# Altium schematic symbol library Miscellaneous.SchLib: 49 symbols
Pins are listed as number, name and electrical type; pins without a type are passive.

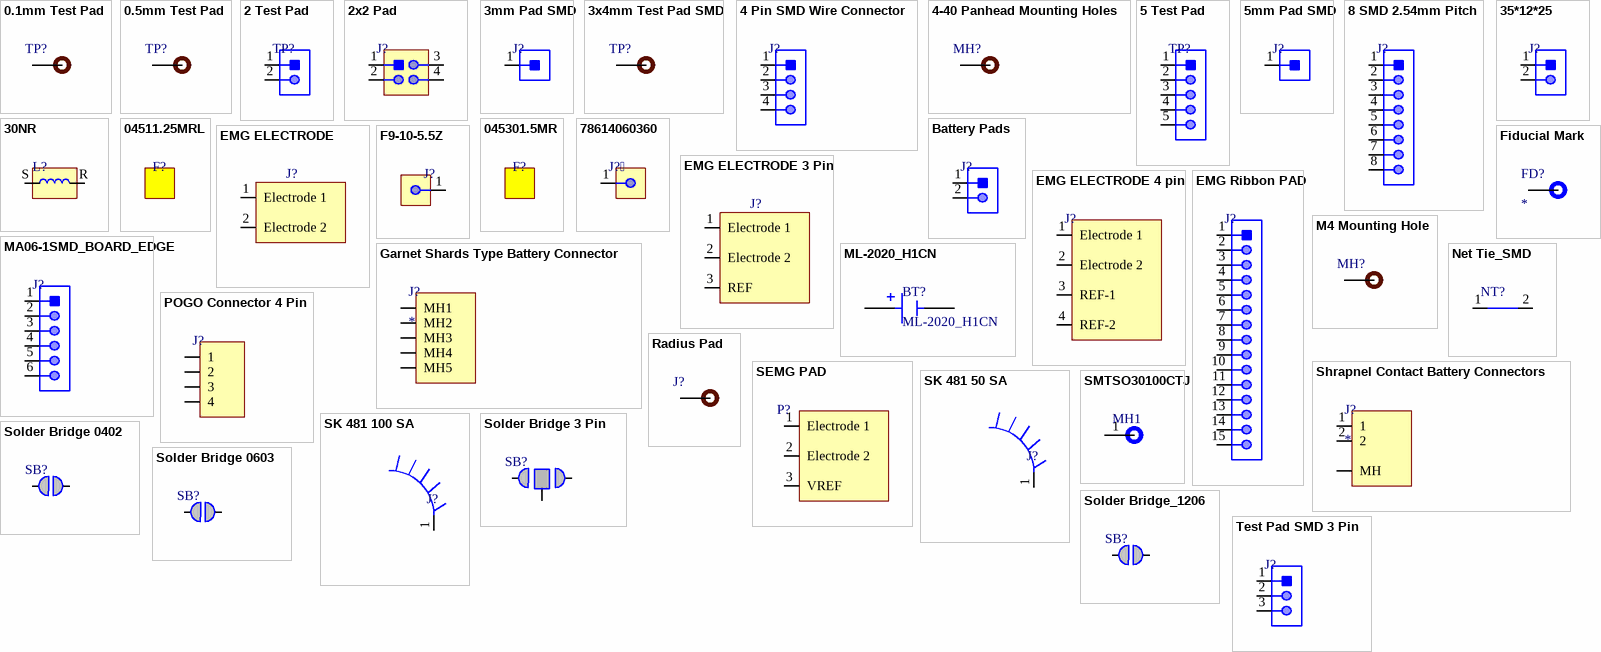
[diagram p0: symbols 0.1mm Test Pad to Test Pad SMD 3 Pin]

## 0.1mm Test Pad
designator TP?  (no BOM)
Test pad
footprint 0.1mm Test Pad
pins: 1

## 0.5mm Test Pad
designator TP?  (no BOM)
Test pad
footprint 0.5mm Test Pad
pins: 1

## 2 Test Pad
designator TP?  (no BOM)
Wire Connecting Pad; Manufacturer Part Number: 2 Test Pad; Item Type: Test Point
footprint 2 Test Pad
pins: 1, 2

## 2x2 Pad
designator J?  (no BOM)
Wire Connecting Pad
footprint 2x2 Pad
pins: 1, 2, 3, 4

## 3mm Pad SMD
designator J?  (no BOM)
-
footprint 3mm Pad SMD
pins: 1

## 3x4mm Test Pad SMD
designator TP?
footprint 3x4mm Test Pad SMD
pins: 1

## 4 Pin SMD Wire Connector
designator J?  (no BOM)
Wire Connecting Pads; Manufacturer Part Number: 4 Pin SMD Wire Connector; Item Type: SMD Pads
footprint 4 Pin SMD Wire CON.
pins: 1, 2, 3, 4

## 4-40 Panhead Mounting Holes
designator MH?  (no BOM)
-; Manufacturer Part Number: M4 Mounting Hole; Item Type: Mounting Hole
footprint 4-40 Panhead Mounting Holes
pins: MH

## 5 Test Pad
designator TP?  (no BOM)
Wire Connecting Pad; Manufacturer Part Number: 5 Test Pad; Item Type: Test Point
footprint 5 Test Pad
pins: 1, 2, 3, 4, 5

## 5mm Pad SMD
designator J?  (no BOM)
-
footprint 5mm Pad SMD
pins: 1

## 8 SMD 2.54mm Pitch
designator J?  (no BOM)
footprint 8 SMD 2.54mm Pitch
pins: 1, 2, 3, 4, 5, 6, 7, 8

## 30NR
designator L?
Magnetic Status Indicator
footprint 30NR
pins: R, S

## 35*12*25
designator J?
35*12*25MM 6063-T5 aluminum Heat sink/heatsink ROHS; Manufacturer: XSD; Manufacturer Part Number: 35*12*25; LCSC Part Number: C4663; Item Type: Heat sink; ComponentLink1Description: LCSC; ComponentLink1URL: https://www.lcsc.com/product-detail/Heat-sink-heatsink_XSD-35-12-25_C4663.html
footprint 35*12*25
pins: 1, 2

## 04511.25MRL
designator F?  (mechanical)
FUSE BRD MT 1.25A 125VAC/VDC SMD; Manufacturer: Littelfuse; Manufacturer Part Number: 0451.125MRL; Item Type: Fuses; Supplier: Digikey; LCSC Part Number: C178983; RoHS: Yes; Stock: 2396; Pricing: 1=2.97, 5=2.46, 10=2.271, 50=1.8836, 100=1.7375, 250=1.56084, 500=1.43862 (USD); ComponentLink1URL: https://datasheet.ciiva.com/14102/co451-453-dat-e-14102912.pdf?src-supplier=Distrelec; ComponentLink1Description: https://datasheet.ciiva.com/14102/co451-453-dat-e-14102912.pdf?src-supplier=Distrelec; ComponentLink2URL: https://datasheet.ciiva.com/1549/319592-1549559.pdf?src-supplier=Element14; ComponentLink2Description: https://datasheet.ciiva.com/1549/319592-1549559.pdf?src-supplier=Element14; ComponentLink3URL: https://datasheet.ciiva.com/1549/319592-1549560.pdf?src-supplier=Element14; ComponentLink3Description: https://datasheet.ciiva.com/1549/319592-1549560.pdf?src-supplier=Element14; ComponentLink4URL: https://datasheet.ciiva.com/300/littelfuse-fuse-451-453-300249.pdf?src-supplier=Digikey; ComponentLink4Description: https://datasheet.ciiva.com/300/littelfuse-fuse-451-453-300249.pdf?src-supplier=Digikey; ComponentLink5URL: https://datasheet.ciiva.com/300/littelfuse-fuse-451-453-300250.pdf?src-supplier=Digikey; ComponentLink5Description: https://datasheet.ciiva.com/300/littelfuse-fuse-451-453-300250.pdf?src-supplier=Digikey; ComponentLink6URL: https://datasheet.ciiva.com/300/littelfuse-fuse-451-453-300251.pdf?src-supplier=Digikey; ComponentLink6Description: https://datasheet.ciiva.com/300/littelfuse-fuse-451-453-300251.pdf?src-supplier=Digikey

## 045301.5MR
designator F?  (mechanical)
FUSE BRD MNT 1.5A 125VAC/VDC SMD; Manufacturer: Littelfuse; Manufacturer Part Number: 045301.5MR; Item Type: Fuses; Supplier: Digikey; LCSC Part Number: C178994; RoHS: Yes; Stock: 1398; Pricing: 1=1.32, 5=1.276, 10=1.193, 50=0.9874, 100=0.8228, 250=0.80224, 500=0.67882 (USD); ComponentLink1URL: https://datasheet.ciiva.com/16378/littelfuse-fuse-451-453-16378313.pdf?src-supplier=Future+Electronics; ComponentLink1Description: https://datasheet.ciiva.com/16378/littelfuse-fuse-451-453-16378313.pdf?src-supplier=Future+Electronics; ComponentLink2URL: https://datasheet.ciiva.com/7991/littelfuse-fuse-451-453-7991903.pdf?src-supplier=Element14; ComponentLink2Description: https://datasheet.ciiva.com/7991/littelfuse-fuse-451-453-7991903.pdf?src-supplier=Element14; ComponentLink3URL: https://datasheet.ciiva.com/46406/1788341-46406156.pdf?src-supplier=Element14; ComponentLink3Description: https://datasheet.ciiva.com/46406/1788341-46406156.pdf?src-supplier=Element14; ComponentLink4URL: https://datasheet.ciiva.com/300/littelfuse-fuse-451-453-300028.pdf?src-supplier=Digikey; ComponentLink4Description: https://datasheet.ciiva.com/300/littelfuse-fuse-451-453-300028.pdf?src-supplier=Digikey; ComponentLink5URL: https://datasheet.ciiva.com/15187/getdatasheetpartid-221064-15187549.pdf?src-supplier=Verical; ComponentLink5Description: https://datasheet.ciiva.com/15187/getdatasheetpartid-221064-15187549.pdf?src-supplier=Verical; ComponentLink6URL: https://datasheet.ciiva.com/300/littelfuse-fuse-451-453-300029.pdf?src-supplier=Digikey; ComponentLink6Description: https://datasheet.ciiva.com/300/littelfuse-fuse-451-453-300029.pdf?src-supplier=Digikey; ComponentLink7URL: https://datasheet.ciiva.com/300/littelfuse-fuse-451-453-300030.pdf?src-supplier=Digikey; ComponentLink7Description: https://datasheet.ciiva.com/300/littelfuse-fuse-451-453-300030.pdf?src-supplier=Digikey; ComponentLink8URL: https://datasheet.ciiva.com/299/littelfuse-fuse-451-453-299721.pdf?src-supplier=Digikey; ComponentLink8Description: https://datasheet.ciiva.com/299/littelfuse-fuse-451-453-299721.pdf?src-supplier=Digikey; ComponentLink9URL: https://datasheet.ciiva.com/299/littelfuse-fuse-451-453-299722.pdf?src-supplier=Digikey; ComponentLink9Description: https://datasheet.ciiva.com/299/littelfuse-fuse-451-453-299722.pdf?src-supplier=Digikey; ComponentLink10URL: https://datasheet.ciiva.com/299/littelfuse-fuse-451-453-299723.pdf?src-supplier=Digikey; ComponentLink10Description: https://datasheet.ciiva.com/299/littelfuse-fuse-451-453-299723.pdf?src-supplier=Digikey

## 78614060360
designator J?
WA-SMSA SMT STEEL SPACER WITH IN; Manufacturer: Würth Elektronik; Manufacturer Part Number: 78614060360; Package: Custom; LCSC Part Number: -; Item Type: Spacer
footprint 78614060360
pins: 1

## Battery Pads
designator J?  (no BOM)
Wire Connecting Pads
footprint Battery Pads
pins: 1, 2

## EMG ELECTRODE
designator J?
Sensor Connecting Pads
footprint EMG 2 PAD
pins: 1 Electrode 1, 2 Electrode 2

## EMG ELECTRODE 3 Pin
designator J?
Sensor Connecting Pads
footprint EMG 3 Pad
pins: 1 Electrode 1, 2 Electrode 2, 3 REF

## EMG ELECTRODE 4 pin
designator J?  (no BOM)
Sensor Connecting Pads
footprint EMG ELECTRODE 4 pin
pins: 1 Electrode 1, 2 Electrode 2, 3 REF-1, 4 REF-2

## EMG Ribbon PAD
designator J?  (no BOM)
footprint EMG Ribbon PAD
pins: 1, 2, 3, 4, 5, 6, 7, 8, 9, 10, 11, 12, 13, 14, 15

## F9-10-5.5Z
designator J?
Press spring; Manufacturer: Sam&wing; Manufacturer Part Number: F9-10-5.5Z; Package: Custom; LCSC Part Number: C5143797; Item Type: Press spring; ComponentLink1Description: LCSC; ComponentLink1URL: https://www.lcsc.com/product-detail/Press-spring_Sam-wing-F9-10-5-5Z_C5143797.html
footprint F9-10-5.5Z
pins: 1

## Fiducial Mark
designator FD?
footprint Fiducial mark
pins: 1

## Garnet Shards Type Battery Connector
designator J?
Garnet Shards Type Battery Connector
footprint Garnet Shards Type Battery Connector
pins: MH1, MH2, MH3, MH4, MH5

## M4 Mounting Hole
designator MH?  (no BOM)
-; Manufacturer Part Number: M4 Mounting Hole; Item Type: Mounting Hole
footprint M4 Mounting Hole
pins: MH

## MA06-1SMD_BOARD_EDGE
designator J?  (no BOM)
TSM-106-X-SH-BOARDEDGE
footprint TSM-106-X-SH-BOARDEDGE
pins: 1, 2, 3, 4, 5, 6

## ML-2020_H1CN
designator BT?
Coin, 20.0mm 3 V Lithium Battery Rechargeable (Secondary) 45mAh; Manufacturer: Panasonic -; Manufacturer Part Number: ML-2020/H1CN; SnapEDA_Link: https://www.snapeda.com/parts/ML-2020/H1CN/Panasonic/view-part/?ref=snap; Package: None; Value: *; Check_prices: https://www.snapeda.com/parts/ML-2020/H1CN/Panasonic/view-part/?ref=eda
footprint BAT_ML-2020_H1CN
pins: N NEG, P POS

## Net Tie_SMD
designator NT?  (net tie, no BOM)
Net Tie SMD; Manufacturer Part Number: Net Tie; Item Type: Net Tie Pad
footprint Net Tie Pad
pins: 1, 2

## POGO Connector 4 Pin
designator J?  (no BOM)
Pogo Pad 2.5mm 4 Pin; Manufacturer Part Number: POGO Connector 4 Pin; Item Type: Pogo Connector
footprint Pogo 4 Pin
pins: 1, 2, 3, 4

## Radius Pad
designator J?
Wire Connecting pad; ComponentLink1Description: LCSC; ComponentLink1URL: *
footprint Radius Pad
pins: 1

## SEMG PAD
designator P?
Sensor Connecting Pads
footprint SEMG-PAD
pins: 1 Electrode 1, 2 Electrode 2, 3 VREF

## Shrapnel Contact Battery Connectors
designator J?
2P Shrapnel Contact Battery Connectors
footprint Shrapnel Contact Battery Connectors
pins: 1, 2, MH

## SK 481 50 SA
designator J?
Extruded Heatsink for lock-in re; Manufacturer: Fischer Elektronik; Manufacturer Part Number: SK 481 50 SA; Package: Custom; LCSC Part Number: -; Item Type: Heatsink; ComponentLink1Description: Digikey; ComponentLink1URL: https://www.digikey.lt/en/products/detail/fischer-elektronik/SK-481-50-SA/25828804
footprint SK 481 50 SA
pins: 1

## SK 481 100 SA
designator J?
Extruded Heatsink for lock-in re; Manufacturer: Fischer Elektronik; Manufacturer Part Number: SK 481 100 SA; Package: Custom; LCSC Part Number: -; Item Type: Heatsink; ComponentLink1Description: Digikey; ComponentLink1URL: https://www.digikey.si/en/products/detail/fischer-elektronik/SK-481-100-SA/25827553
footprint SK 481 100 SA
pins: 1

## SMTSO30100CTJ
designator MH1
Board Spacers, Standoffs RoHS; Manufacturer: Sinhoo; Manufacturer Part Number: SMTSO30100CTJ; Item Type: Spacer; Package: Custom; LCSC Part Number: C2916370; ComponentLink1Description: LCSC; ComponentLink1URL: https://www.lcsc.com/product-detail/C2916370.html
footprint SMTSO30100CTJ-
pins: 1

## Solder Bridge 3 Pin
designator SB?  (no BOM)
Solder Bridge ON; Manufacturer Part Number: Solder Bridge; Item Type: Solder Bridge
footprint Solder Bridge 3 Pin
pins: 1, 2, 3

## Solder Bridge 0402
designator SB?  (no BOM)
Solder Bridge ON; Manufacturer Part Number: Solder Bridge 0402; Item Type: Solder Bridge
footprint Solder Bridge 0402
pins: 1 0, 2 1

## Solder Bridge 0603
designator SB?  (no BOM)
Solder Bridge ON; Manufacturer Part Number: Solder Bridge; Item Type: Solder Bridge
footprint Solder Bridge (Solder Bridge ON)
pins: 1 0, 2 1

## Solder Bridge_1206
designator SB?  (no BOM)
Solder Bridge ON; Manufacturer Part Number: Solder Bridge_1206; Item Type: Solder Bridge
footprint SOLDER BRIDGE-1206_
pins: 1 0, 2 1

## Test Pad SMD 3 Pin
designator J?  (no BOM)
Test Pad
footprint Test Pad (SMD 3 Pin)
pins: 1, 2, 3

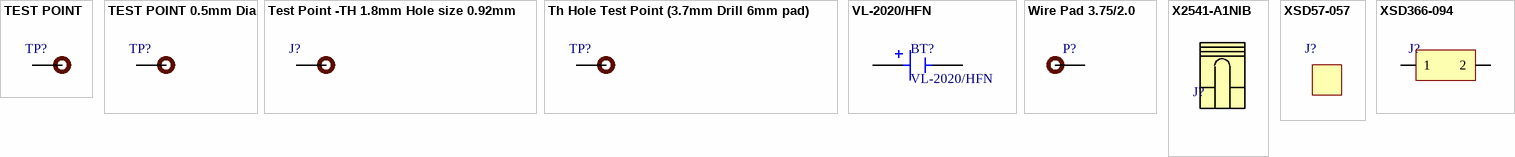
[diagram p1: symbols TEST POINT to XSD366-094]

## TEST POINT
designator TP?  (no BOM)
Test Point ON; Item Type: TEST POINT
footprint Test-point
pins: 1

## TEST POINT 0.5mm Dia
designator TP?  (no BOM)
Test Point ON; Manufacturer Part Number: TEST POINT 0.5mm Dia; Item Type: Test Point
footprint Test-point - 0.5mm
pins: 1

## Test Point -TH 1.8mm Hole size 0.92mm
designator J?  (no BOM)
footprint Test Point -TH 1.8mm Hole size 0.92mm
pins: 1

## Th Hole Test Point (3.7mm Drill 6mm pad)
designator TP?  (no BOM)
-; Manufacturer Part Number: Th Hole Test Point; Item Type: Test Point
footprint Th Hole Test Point (3.7mm Drill 6mm pad)
pins: 1

## VL-2020/HFN
designator BT?
Coin Cell Battery 3V 20mAH RECHG 2 PIN HORZ 20 x 2 mm; Manufacturer: Panasonic -; Mouser_Link: https://my.mouser.com/ProductDetail/Panasonic-Battery/VL-2020-HFN?qs=1eQvB6Dk1vjiByYlW3jlUA%3D%3D; Package: None; Value: -; Manufacturer Part Number: VL-2020/HFN; Datasheet: https://energy.panasonic.com/dam/master/pdf/en/datasheet/coin-rechargeable/VL2020_Datasheet_EN_240701.pdf
footprint BAT_ML-2020_H1CN
pins: N NEG, P POS

## Wire Pad 3.75/2.0
designator P?  (graphical)
Wire Connecting Pad 3.75/2.0
footprint Wire Pad 3.75/2.0
pins: 1

## X2541-A1NIB
designator J?  (mechanical)
Open top 3A 2.54mm P=2.54mm Shunts, Jumpers ROHS; Manufacturer: XKB Connection; Manufacturer Part Number: X2541-A1NIB; Item Type: Jumper; Package: P=2.54mm; LCSC Part Number: C2938578; ComponentLink1Description: LCSC; ComponentLink1URL: https://www.lcsc.com/product-detail/Shunts-Jumpers_XKB-Connection-X2541-A1NIB_C2938578.html

## XSD57-057
designator J?  (mechanical)
Manufacturer Part Number: XSD57-057; Manufacturer: XSD; LCSC Part Number: C286226

## XSD366-094
designator J?
42*25*25MM Heat sink/heatsink; Manufacturer: XSD; Manufacturer Part Number: XSD366-094; Package: Custom; LCSC Part Number: C286227; Item Type: Heatsink; ComponentLink1Description: LCSC; ComponentLink1URL: https://www.lcsc.com/product-detail/Heat-sink-heatsink_XSD-XSD366-094_C286227.html
footprint XSD366-094
pins: 1, 2